# Altium footprint library Connectors.PcbLib: 49 footprints (part 4 of 4)
Each footprint in its own frame and in the unit in brackets; x right, y up, seen from the top. Pads: shape width x height; smd on the part's side, far side on the other; paste and mask are expansions set on the pad; w line width, h text height; cw(c..) or ccw(c..) is an arc to the next point about the centre after c.
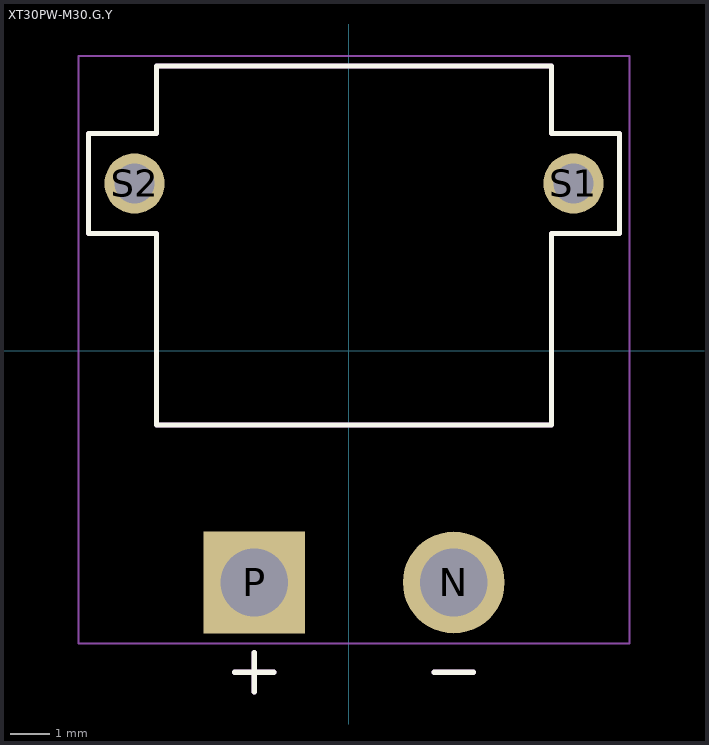
[diagram p3: the footprint, top view; thin cyan lines are the x and y axes]

## XT30PW-M30.G.Y [mm]
pads (4):
  round 2.55 hole 1.7: N(2.627,-5.809)
  rect 2.55x2.55 / inner round 2.55 / far side rect 2.55x2.55 hole 1.7: P(-2.373,-5.809)
  round 1.508 hole 1: S1(5.627,4.191) S2(-5.373,4.191)
Top Overlay:
  lines w0.127: -2.873,-8.059 -1.873,-8.059 ; -2.373,-8.559 -2.373,-7.559 ; 2.127,-8.059 3.127,-8.059 ; -6.523,2.941 -4.823,2.941 -4.823,-1.859 5.077,-1.859 5.077,2.941 6.777,2.941 6.777,5.441 5.077,5.441 5.077,7.141 -4.823,7.141 -4.823,5.441 -6.523,5.441 -6.523,2.941
Mechanical 13:
  lines w0.127: -2.873,-8.059 -1.873,-8.059 ; -2.373,-8.559 -2.373,-7.559 ; 2.127,-8.059 3.127,-8.059 ; -6.523,2.941 -4.823,2.941 -4.823,-1.859 5.077,-1.859 5.077,2.941 6.777,2.941 6.777,5.441 5.077,5.441 5.077,7.141 -4.823,7.141 -4.823,5.441 -6.523,5.441 -6.523,2.941
Mechanical 15:
  lines w0.05: -6.773,-7.334 -6.773,7.391 7.027,7.391 7.027,-7.334 -6.773,-7.334
3D body "step_temp.STEP": height 5, standoff -2, extent -6.523,-6.809 6.777,7.141